# Altium footprint library IRFZ48NPBF.PcbLib: 1 footprints
Each footprint in its own frame and in the unit in brackets; x right, y up, seen from the top. Pads: shape width x height; smd on the part's side, far side on the other; paste and mask are expansions set on the pad; w line width, h text height; cw(c..) or ccw(c..) is an arc to the next point about the centre after c.
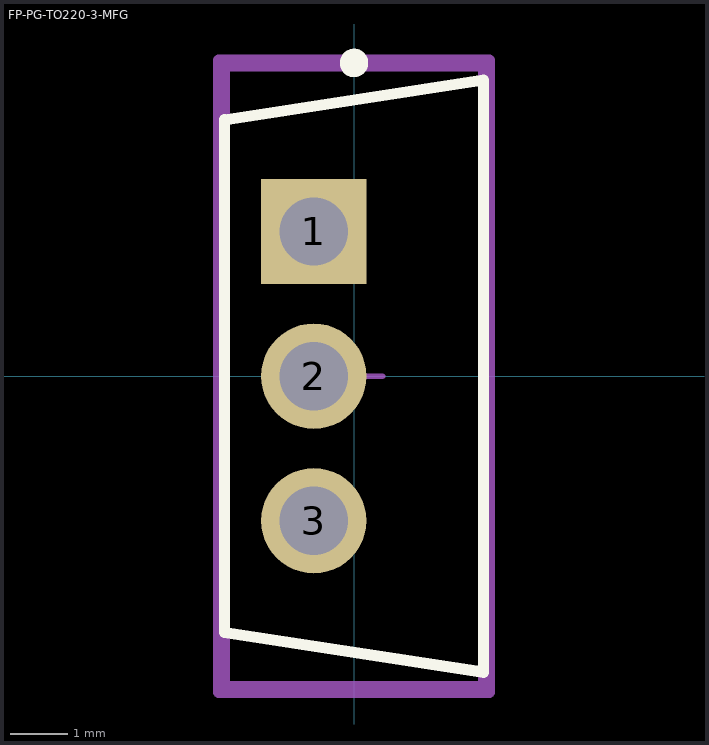
[diagram p0: the footprint, top view; thin cyan lines are the x and y axes]

## FP-PG-TO220-3-MFG [mm]
pads (3):
  rect 1.85x1.85 hole 1.2 paste-2539.97 mask+0: 1(-0.705,2.54)
  round 1.85 hole 1.2 paste-2539.97 mask+0: 2(-0.705,0) 3(-0.705,-2.54)
Top Overlay:
  circle w0.25: c0,5.5 r0.125
  lines w0.2: -2.275,-4.5 -2.275,4.5 2.275,5.2 2.275,-5.2 -2.275,-4.5
Top Assembly:
  lines w0.2: -2.375,-5.55 -2.375,5.55 2.375,5.55 2.375,-5.55 -2.375,-5.55
  text ".Designator" at 0,0 h1
Top 3D Body:
  lines w0.2: -2.275,-5.45 -2.275,5.45 2.275,5.45 2.275,-5.45 -2.275,-5.45
Top Courtyard:
  lines w0.2: -2.375,-5.55 -2.375,5.55 2.375,5.55 2.375,-5.55 -2.375,-5.55
Top Component Center:
  lines w0.1: -0.5,0 0.5,0 ; 0,-0.5 0,0.5
3D body "Trans_Infineon_IRL2505PBF_eec.STEP": height 0.25, standoff 0, extent -2.375,-5.55 2.375,5.55